# Altium footprint library Footprints.PcbLib: 320 footprints (part 3 of 20)
Each footprint in its own frame and in the unit in brackets; x right, y up, seen from the top. Pads: shape width x height; smd on the part's side, far side on the other; paste and mask are expansions set on the pad; w line width, h text height; cw(c..) or ccw(c..) is an arc to the next point about the centre after c.
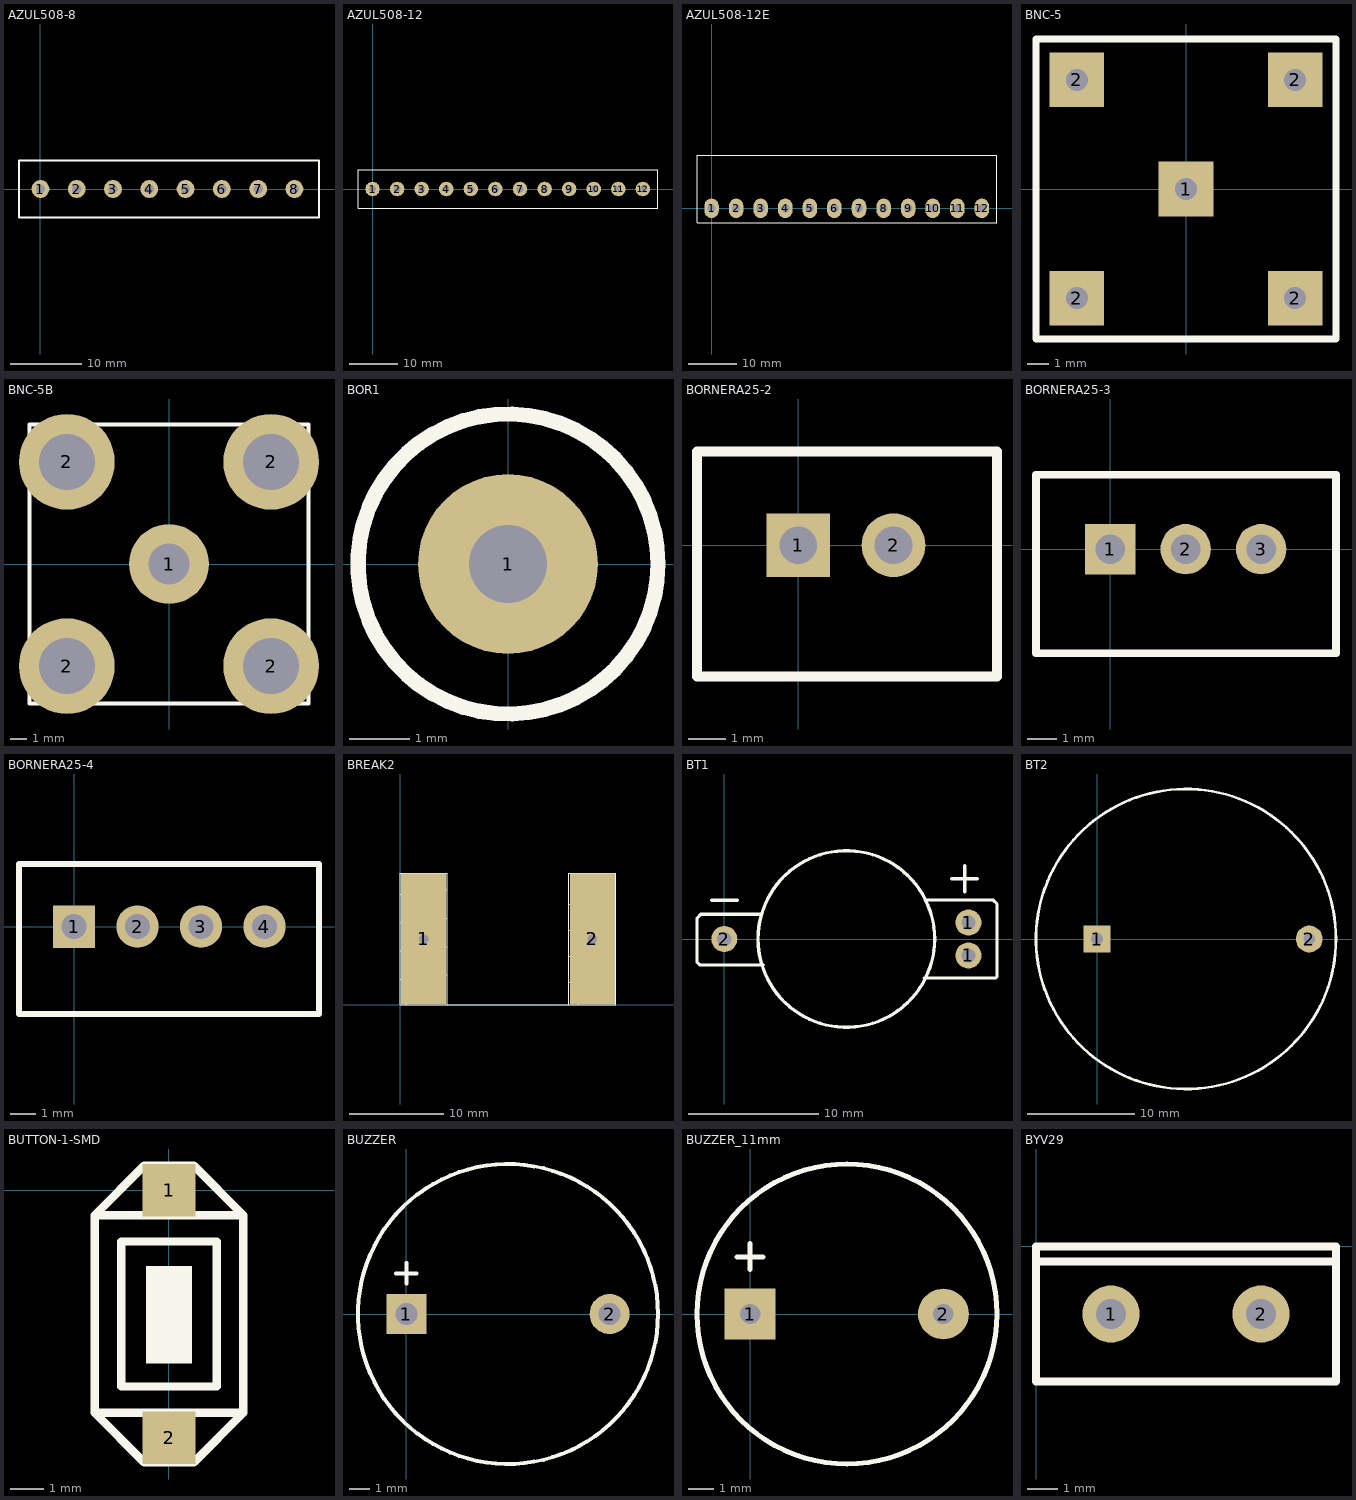
[diagram p2: the footprints below, top view; thin cyan lines are the x and y axes]

## AZUL508-8 [mm]
pads (8):
  round 2.5 hole 1.3: 1(0,0) 2(5.08,0) 3(10.16,0) 4(15.24,0) 5(20.32,0) 6(25.4,0) 7(30.48,0) 8(35.56,0)
Top Overlay:
  lines w0.254: -3,-4 39,-4 39,4 -3,4 -3,-4

## AZUL508-12 [mm]
pads (12):
  round 3 hole 1.4: 1(0,0) 2(5.08,0) 3(10.16,0) 4(15.24,0) 5(20.32,0) 6(25.4,0) 7(30.48,0) 8(35.56,0) 9(40.64,0) 10(45.72,0) 11(50.8,0) 12(55.88,0)
Top Overlay:
  lines w0.254: -3,-0.05 -3,4 59,4 59,-4 -3,-4 -3,0

## AZUL508-12E [mm]
pads (12):
  oval 3x4 hole 1.7: 1(0,0) 2(5.08,0) 3(10.16,0) 4(15.24,0) 5(20.32,0) 6(25.4,0) 7(30.48,0) 8(35.56,0) 9(40.64,0) 10(45.72,0) 11(50.8,0) 12(55.88,0)
Top Overlay:
  lines w0.254: -3,-3 -3,11 59,11 59,-3 -3,-3

## BNC-5 [mil]
pads (5):
  rect 100x100 hole 40: 1(0,0) 2(-200,-200) 2(-200,200) 2(200,-200) 2(200,200)
Top Overlay:
  lines w12: -275,-275 -275,275 275,275 275,-275 -275,-275

## BNC-5B [mm]
pads (5):
  round 5 hole 2.6: 1(0,0)
  round 6 hole 3.5: 2(-6.4,-6.4) 2(-6.4,6.4) 2(6.4,-6.4) 2(6.4,6.4)
Top Overlay:
  lines w0.254: -8.75,-8.75 -8.75,8.75 8.75,8.75 8.75,-8.75 -8.75,-8.75

## BOR1 [mm]
pads (1):
  round 3 hole 1.3: 1(0,0)
Top Overlay:
  circle w0.254: c0,0 r2.5

## BORNERA25-2 [mm]
pads (2):
  rect 1.7x1.7 hole 1: 1(0,0)
  round 1.7 hole 1: 2(2.54,0)
Top Overlay:
  lines w0.254: -2.7,-3.5 5.3,-3.5 5.3,2.5 -2.7,2.5 -2.7,-3.5

## BORNERA25-3 [mm]
pads (3):
  rect 1.7x1.7 hole 1: 1(0,0)
  round 1.7 hole 1: 2(2.54,0) 3(5.08,0)
Top Overlay:
  lines w0.254: -2.5,-3.5 -2.5,2.5 7.6,2.5 7.6,-3.5 -2.5,-3.5

## BORNERA25-4 [mm]
pads (4):
  rect 1.7x1.7 hole 1: 1(0,0)
  round 1.7 hole 1: 2(2.54,0) 3(5.08,0) 4(7.62,0)
Top Overlay:
  lines w0.254: -2.2,-3.5 9.8,-3.5 9.8,2.5 -2.2,2.5 -2.2,-3.5

## BREAK2 [mm]
pads (2):
  rect 4.8x14 hole 1: 1(2.5,7) 2(20.5,7)
Mid-Layer 2:
  circle w0.064: c23,14 r0.032
  circle w0.064: c23,0 r0.032
  circle w0.064: c5,14 r0.032
  circle w0.064: c18,14 r0.032
  circle w0.064: c18,14 r0.032
  circle w0.064: c23,14 r0.032
  circle w0.064: c0,14 r0.032
  circle w0.064: c5,14 r0.032
Top Overlay:
  lines w0.127: 0,2.646 5,6.25 ; 0,5.675 5,9.279 ; 0,8.704 5,12.307 ; 0,11.732 3.146,14 ; 0.53,0 5,3.221 ; 18,2.341 23,4.982 ; 18,5.119 23,7.761 ; 18,7.898 23,10.539 ; 18,10.677 23,13.318 ; 18.829,0 23,2.203 ; 5,0 0,0 0,14 5,14 5,0 ; 5,0 18,0 ; 18,0 23,0 23,14 18,14 18,0

## BT1 [mm]
pads (3):
  round 2 hole 1.1: 1(18.8,1.27) 1(18.8,-1.27) 2(0,0)
Top Overlay:
  circle w0.254: c9.4,0 r6.801
  lines w0.254: -0.984,2.993 1.006,2.993 ; 2.9,1.9 -1.8,1.9 -2.1,1.6 -2.1,-1.8 -1.9,-2 3,-2 ; 15.4,-3 20.9,-3 21,-2.9 21,2.7 20.7,3 15.5,3 ; 17.506,4.643 19.506,4.643 ; 18.506,3.643 18.506,5.643

## BT2 [mm]
pads (2):
  rect 2.5x2.5 hole 1.1: 1(0,0)
  round 2.5 hole 1.1: 2(19.8,0)
Top Overlay:
  circle w0.254: c8.3,0 r14

## BUTTON-1-SMD [mm]
pads (2):
  rect 1.6x1.6 smd: 1(0,0) 2(0,-7.5)
Top Overlay:
  rectangle: -0.7,-5.25 0.7,-2.3
  lines w0.254: -2.25,-6.75 -0.75,-8.25 0.75,-8.25 2.25,-6.75 ; -2.25,-6.75 2.25,-6.75 ; -2.25,-6.75 -2.25,-0.75 ; -2.25,-0.75 -0.75,0.75 0.75,0.75 2.25,-0.75 ; -2.25,-0.75 2.25,-0.75 ; 2.25,-6.75 2.25,-0.75 ; -1.45,-5.95 -1.45,-1.55 1.45,-1.55 1.45,-5.95 -1.45,-5.95

## BUZZER [mm]
pads (2):
  rect 2x2 hole 1.1: 1(0,0)
  round 2 hole 1.1: 2(10.16,0)
Top Overlay:
  circle w0.2: c5.08,0 r7.5
  lines w0.2: -0.508,2.032 0.508,2.032 ; 0,1.524 0,2.54

## BUZZER_11mm [mm]
pads (2):
  rect 2x2 hole 0.8: 1(0,0)
  round 2 hole 0.8: 2(7.6,0)
Top Overlay:
  circle w0.2: c3.81,0 r5.9
  lines w0.2: -0.516,2.25 0.5,2.25 ; 0,1.75 0,2.766
3D body "pb-12n23p-03q.step": height 10, standoff -6, extent -2.19,-6 9.81,6

## BYV29 [mm]
pads (2):
  round 1.9 hole 1: 1(2.5,-2.25) 2(7.5,-2.25)
Top Overlay:
  lines w0.254: 0,-0.5 10,-0.5 ; 0,-4.5 10,-4.5 10,0 0,0 0,-4.5